# Altium schematic symbol library WE-HCIM.SchLib: 11 symbols
Pins are listed as number, name and electrical type; pins without a type are passive.

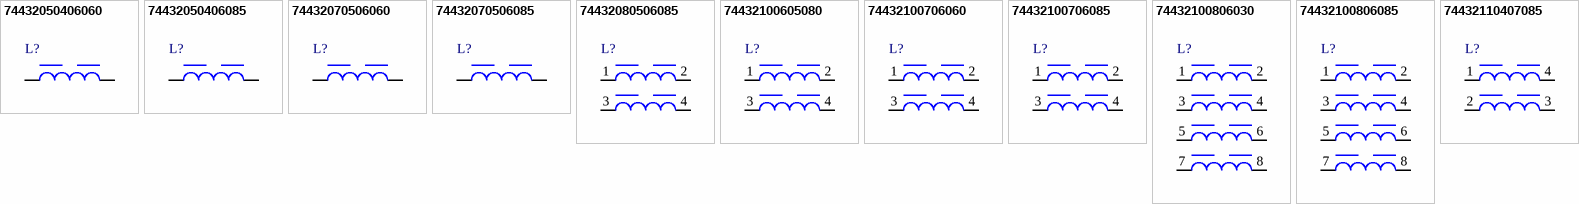
[diagram p0: symbols 74432050406060 to 74432110407085]

## 74432050406060
designator L?, comment 60nH  (value not drawn)
WE-HCIM High-Current Molded Inductor for Multiphase Applications, SMT, size 050406, 60nH, 65A, 0.23mohm; Manufacturer Part Number: 74432050406060; Manufacturer: Wurth Elektronik; Case/Size Code: 050406; Operating Voltage: 60V; Saturation Current @ 30%: 79A; Self Resonant Frequency: 361MHz; Product Series: WE-HCIM; ComponentLink1Description: Website Link; ComponentLink1URL: https://www.we-online.com; ComponentLink2Description: Datasheet Link; ComponentLink2URL: https://www.we-online.com/components/products/datasheet/74432050406060; Mount: Surface Mount; Operating Temperature Min: -55degC; Operating Temperature Max: 155degC; Packaging: Tape and Reel; Length: 4.8mm; Width: 3.8mm; Height: 5.8mm; DC Resistance: 0.23mohm; Inductance: 60nH; Performance Rated Current: 65A
footprint WE-HCIM_050406
pins: 1, 2

## 74432050406085
designator L?, comment 85nH  (value not drawn)
WE-HCIM High-Current Molded Inductor for Multiphase Applications, SMT, size 050406, 85nH, 65A, 0.23mohm; Manufacturer Part Number: 74432050406085; Manufacturer: Wurth Elektronik; Case/Size Code: 050406; Operating Voltage: 60V; Saturation Current @ 30%: 68A; Self Resonant Frequency: 335MHz; Product Series: WE-HCIM; ComponentLink1Description: Website Link; ComponentLink1URL: https://www.we-online.com; ComponentLink2Description: Datasheet Link; ComponentLink2URL: https://www.we-online.com/components/products/datasheet/74432050406085; Mount: Surface Mount; Operating Temperature Min: -55degC; Operating Temperature Max: 155degC; Packaging: Tape and Reel; Length: 4.8mm; Width: 3.8mm; Height: 5.8mm; DC Resistance: 0.23mohm; Inductance: 85nH; Performance Rated Current: 65A
footprint WE-HCIM_050406
pins: 1, 2

## 74432070506060
designator L?, comment 60nH  (value not drawn)
WE-HCIM High-Current Molded Inductor for Multiphase Applications, SMT, size 070506, 60nH, 80A, 0.12mohm; Manufacturer Part Number: 74432070506060; Manufacturer: Wurth Elektronik; Case/Size Code: 070506; Operating Voltage: 60V; Saturation Current @ 30%: 103A; Self Resonant Frequency: 385MHz; Product Series: WE-HCIM; ComponentLink1Description: Website Link; ComponentLink1URL: https://www.we-online.com; ComponentLink2Description: Datasheet Link; ComponentLink2URL: https://www.we-online.com/components/products/datasheet/74432070506060; Mount: Surface Mount; Operating Temperature Min: -55degC; Operating Temperature Max: 155degC; Packaging: Tape and Reel; Length: 7.1mm; Width: 4.7mm; Height: 5.8mm; DC Resistance: 0.12mohm; Inductance: 60nH; Performance Rated Current: 80A
footprint WE-HCIM_070506
pins: 1, 2

## 74432070506085
designator L?, comment 85nH  (value not drawn)
WE-HCIM High-Current Molded Inductor for Multiphase Applications, SMT, size 070506, 85nH, 74A, 0.14mohm; Manufacturer Part Number: 74432070506085; Manufacturer: Wurth Elektronik; Case/Size Code: 070506; Operating Voltage: 60V; Saturation Current @ 30%: 82A; Self Resonant Frequency: 355MHz; Product Series: WE-HCIM; ComponentLink1Description: Website Link; ComponentLink1URL: https://www.we-online.com; ComponentLink2Description: Datasheet Link; ComponentLink2URL: https://www.we-online.com/components/products/datasheet/74432070506085; Mount: Surface Mount; Operating Temperature Min: -55degC; Operating Temperature Max: 155degC; Packaging: Tape and Reel; Length: 7.1mm; Width: 4.7mm; Height: 5.8mm; DC Resistance: 0.14mohm; Inductance: 85nH; Performance Rated Current: 74A
footprint WE-HCIM_070506
pins: 1, 2

## 74432080506085
designator L?, comment 85nH  (value not drawn)
WE-HCIM High-Current Molded Inductor for Multiphase Applications, SMT, size 080506, 85nH, 33A, 0.24mohm; Manufacturer Part Number: 74432080506085; Manufacturer: Wurth Elektronik; Case/Size Code: 080506; Coupling Coefficient: 0.1; Operating Voltage: 60V; Saturation Current @ 30%: 67A; Self Resonant Frequency: 299MHz; Product Series: WE-HCIM; ComponentLink1Description: Website Link; ComponentLink1URL: https://www.we-online.com; ComponentLink2Description: Datasheet Link; ComponentLink2URL: https://www.we-online.com/components/products/datasheet/74432080506085; Mount: Surface Mount; Operating Temperature Min: -55degC; Operating Temperature Max: 155degC; Packaging: Tape and Reel; Length: 7.8mm; Width: 4.8mm; Height: 5.8mm; DC Resistance: 0.24mohm; Inductance: 85nH; Performance Rated Current: 33A
footprint WE-HCIM_080506
pins: 1, 2, 3, 4

## 74432100605080
designator L?, comment 80nH  (value not drawn)
WE-HCIM High-Current Molded Inductor for Multiphase Applications, SMT, size 100605, 80nH, 35A, 0.21mohm; Manufacturer Part Number: 74432100605080; Manufacturer: Wurth Elektronik; Case/Size Code: 100605; Coupling Coefficient: 0.1; Operating Voltage: 60V; Saturation Current @ 30%: 75A; Self Resonant Frequency: 252MHz; Product Series: WE-HCIM; ComponentLink1Description: Website Link; ComponentLink1URL: https://www.we-online.com; ComponentLink2Description: Datasheet Link; ComponentLink2URL: https://www.we-online.com/components/products/datasheet/74432100605080; Mount: Surface Mount; Operating Temperature Min: -55degC; Operating Temperature Max: 155degC; Packaging: Tape and Reel; Length: 9.8mm; Width: 5.8mm; Height: 4.8mm; DC Resistance: 0.21mohm; Inductance: 80nH; Performance Rated Current: 35A
footprint WE-HCIM_100605
pins: 1, 2, 3, 4

## 74432100706060
designator L?, comment 60nH  (value not drawn)
WE-HCIM High-Current Molded Inductor for Multiphase Applications, SMT, size 100706, 60nH, 44A, 0.12mohm; Manufacturer Part Number: 74432100706060; Manufacturer: Wurth Elektronik; Case/Size Code: 100706; Coupling Coefficient: 0.1; Operating Voltage: 60V; Saturation Current @ 30%: 125A; Self Resonant Frequency: 344MHz; Product Series: WE-HCIM; ComponentLink1Description: Website Link; ComponentLink1URL: https://www.we-online.com; ComponentLink2Description: Datasheet Link; ComponentLink2URL: https://www.we-online.com/components/products/datasheet/74432100706060; Mount: Surface Mount; Operating Temperature Min: -55degC; Operating Temperature Max: 155degC; Packaging: Tape and Reel; Length: 9.7mm; Width: 7mm; Height: 5.7mm; DC Resistance: 0.12mohm; Inductance: 60nH; Performance Rated Current: 44A
footprint WE-HCIM_100706
pins: 1, 2, 3, 4

## 74432100706085
designator L?, comment 85nH  (value not drawn)
WE-HCIM High-Current Molded Inductor for Multiphase Applications, SMT, size 100706, 85nH, 41A, 0.14mohm; Manufacturer Part Number: 74432100706085; Manufacturer: Wurth Elektronik; Case/Size Code: 100706; Coupling Coefficient: 0.1; Operating Voltage: 60V; Saturation Current @ 30%: 89A; Self Resonant Frequency: 260MHz; Product Series: WE-HCIM; ComponentLink1Description: Website Link; ComponentLink1URL: https://www.we-online.com; ComponentLink2Description: Datasheet Link; ComponentLink2URL: https://www.we-online.com/components/products/datasheet/74432100706085; Mount: Surface Mount; Operating Temperature Min: -55degC; Operating Temperature Max: 155degC; Packaging: Tape and Reel; Length: 9.7mm; Width: 7mm; Height: 5.7mm; DC Resistance: 0.14mohm; Inductance: 85nH; Performance Rated Current: 41A
footprint WE-HCIM_100706
pins: 1, 2, 3, 4

## 74432100806030
designator L?, comment 30nH  (value not drawn)
WE-HCIM High-Current Molded Inductor for Multiphase Applications, SMT, size 100806, 30nH, 32A, 0.24mohm; Manufacturer Part Number: 74432100806030; Manufacturer: Wurth Elektronik; Case/Size Code: 100806; Coupling Coefficient: 0.1; Operating Voltage: 60V; Saturation Current @ 30%: 115A; Self Resonant Frequency: 442MHz; Product Series: WE-HCIM; ComponentLink1Description: Website Link; ComponentLink1URL: https://www.we-online.com; ComponentLink2Description: Datasheet Link; ComponentLink2URL: https://www.we-online.com/components/products/datasheet/74432100806030; Mount: Surface Mount; Operating Temperature Min: -55degC; Operating Temperature Max: 155degC; Packaging: Tape and Reel; Length: 9.8mm; Width: 7.8mm; Height: 5.8mm; DC Resistance: 0.24mohm; Inductance: 30nH; Performance Rated Current: 32A
footprint WE-HCIM_100806
pins: 1, 2, 3, 4, 5, 6, 7, 8

## 74432100806085
designator L?, comment 85nH  (value not drawn)
WE-HCIM High-Current Molded Inductor for Multiphase Applications, SMT, size 100806, 85nH, 32A, 0.24mohm; Manufacturer Part Number: 74432100806085; Manufacturer: Wurth Elektronik; Case/Size Code: 100806; Coupling Coefficient: 0.1; Operating Voltage: 60V; Saturation Current @ 30%: 80A; Self Resonant Frequency: 252MHz; Product Series: WE-HCIM; ComponentLink1Description: Website Link; ComponentLink1URL: https://www.we-online.com; ComponentLink2Description: Datasheet Link; ComponentLink2URL: https://www.we-online.com/components/products/datasheet/74432100806085; Mount: Surface Mount; Operating Temperature Min: -55degC; Operating Temperature Max: 155degC; Packaging: Tape and Reel; Length: 9.8mm; Width: 7.8mm; Height: 5.8mm; DC Resistance: 0.24mohm; Inductance: 85nH; Performance Rated Current: 32A
footprint WE-HCIM_100806
pins: 1, 2, 3, 4, 5, 6, 7, 8

## 74432110407085
designator L?, comment 85nH  (value not drawn)
WE-HCIM High-Current Molded Inductor for Multiphase Applications, SMT, size 110407, 85nH, 54A, 0.14mohm; Manufacturer Part Number: 74432110407085; Manufacturer: Wurth Elektronik; Case/Size Code: 110407; Coupling Coefficient: 0.94; Operating Voltage: 60V; Saturation Current @ 30%: 110A; Self Resonant Frequency: 326MHz; Product Series: WE-HCIM; ComponentLink1Description: Website Link; ComponentLink1URL: https://www.we-online.com; ComponentLink2Description: Datasheet Link; ComponentLink2URL: https://www.we-online.com/components/products/datasheet/74432110407085; Mount: Surface Mount; Operating Temperature Min: -55degC; Operating Temperature Max: 155degC; Packaging: Tape and Reel; Length: 11mm; Width: 4mm; Height: 7.3mm; DC Resistance: 0.14mohm; Inductance: 85nH; Performance Rated Current: 54A
footprint WE-HCIM_110407
pins: 1, 2, 3, 4